# Altium footprint library XTAL_ECS-.327-12.5-17-TR.PcbLib: 1 footprints
Each footprint in its own frame and in the unit in brackets; x right, y up, seen from the top. Pads: shape width x height; smd on the part's side, far side on the other; paste and mask are expansions set on the pad; w line width, h text height; cw(c..) or ccw(c..) is an arc to the next point about the centre after c.
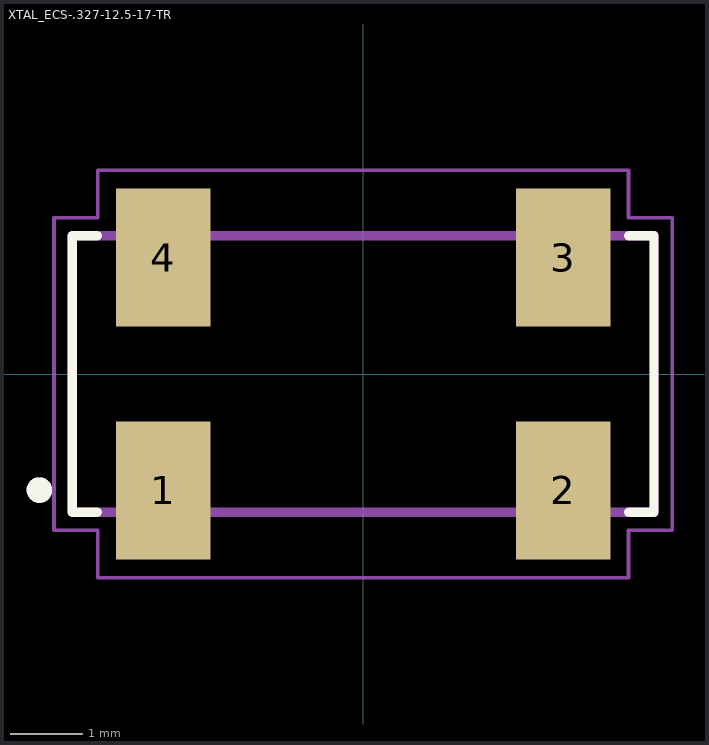
[diagram p0: the footprint, top view; thin cyan lines are the x and y axes]

## XTAL_ECS-.327-12.5-17-TR [mm]
pads (4):
  rect 1.3x1.9 smd: 1(-2.75,-1.6) 2(2.75,-1.6) 3(2.75,1.6) 4(-2.75,1.6)
Top Overlay:
  circle w0.25: c-4.45,-1.596 r0.05
  lines w0.127: -4,-1.9 -4,1.9 ; -3.99,-1.9 -3.654,-1.9 ; -3.99,1.9 -3.654,1.9 ; 3.654,-1.9 3.98,-1.9 3.98,-1.89 ; 3.654,1.9 3.97,1.9 ; 4,-1.9 4,1.9
Mechanical 13:
  circle w0.25: c-4.45,-1.596 r0.05
  lines w0.127: -4,-1.9 4,-1.9 4,1.9 -4,1.9 -4,-1.9
Mechanical 15:
  lines w0.05: -4.25,-2.15 -3.65,-2.15 -3.65,-2.8 3.65,-2.8 3.65,-2.15 4.25,-2.15 4.25,2.15 3.65,2.15 3.65,2.8 -3.65,2.8 -3.65,2.15 -4.25,2.15 -4.25,-2.15